# Altium integrated library Transistores.IntLib: 7 symbols
Pins are listed as number, name and electrical type; pins without a type are passive.

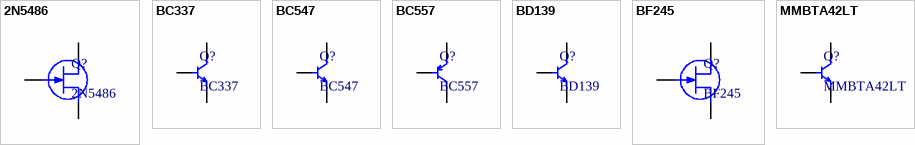
[diagram p0: symbols 2N5486 to MMBTA42LT]

## 2N5486
designator Q?
TO-92 JFET VHF/UHF Amplifiers
footprint TO-92_GDS
pins: 1 D, 2 S, 3 G

## BC337
designator Q?
NPN Epitaxial Silicon Transistor; Datasheet: http://www.redrok.com/NPN_BD135_45V_1.5A_12.5W_Hfe40_TO-126.pdf
footprint TO-92B_CBE
pins: B, C, E

## BC547
designator Q?
TO-92 NPN TRANSISTOR
footprint TO-92_CBE
footprint TO-92B_CBE
footprint TO-92W_CBE
pins: B, C, E

## BC557
designator Q?
General Purpose PNP Transistor
footprint TO-92B_CBE
footprint TO-92B_CBE - HIGH
pins: B, C, E

## BD139
designator Q?
NPN Epitaxial Silicon Transistor: VCBO = 80V - IC = 1,5A; Datasheet: http://www.redrok.com/NPN_BD135_45V_1.5A_12.5W_Hfe40_TO-126.pdf
footprint TO-126
pins: B, C, E

## BF245
designator Q?
TO-92 JFET VHF/UHF Amplifiers
footprint TO-92_GSD
pins: D, G, S

## MMBTA42LT
designator Q?
High Voltage Transistors NPN Silicon 300V 500mA
footprint SOT-23
pins: B, C, E